# Altium footprint library flight_controller_footprint_lib.PcbLib: 48 footprints (part 2 of 3)
Each footprint in its own frame and in the unit in brackets; x right, y up, seen from the top. Pads: shape width x height; smd on the part's side, far side on the other; paste and mask are expansions set on the pad; w line width, h text height; cw(c..) or ccw(c..) is an arc to the next point about the centre after c.
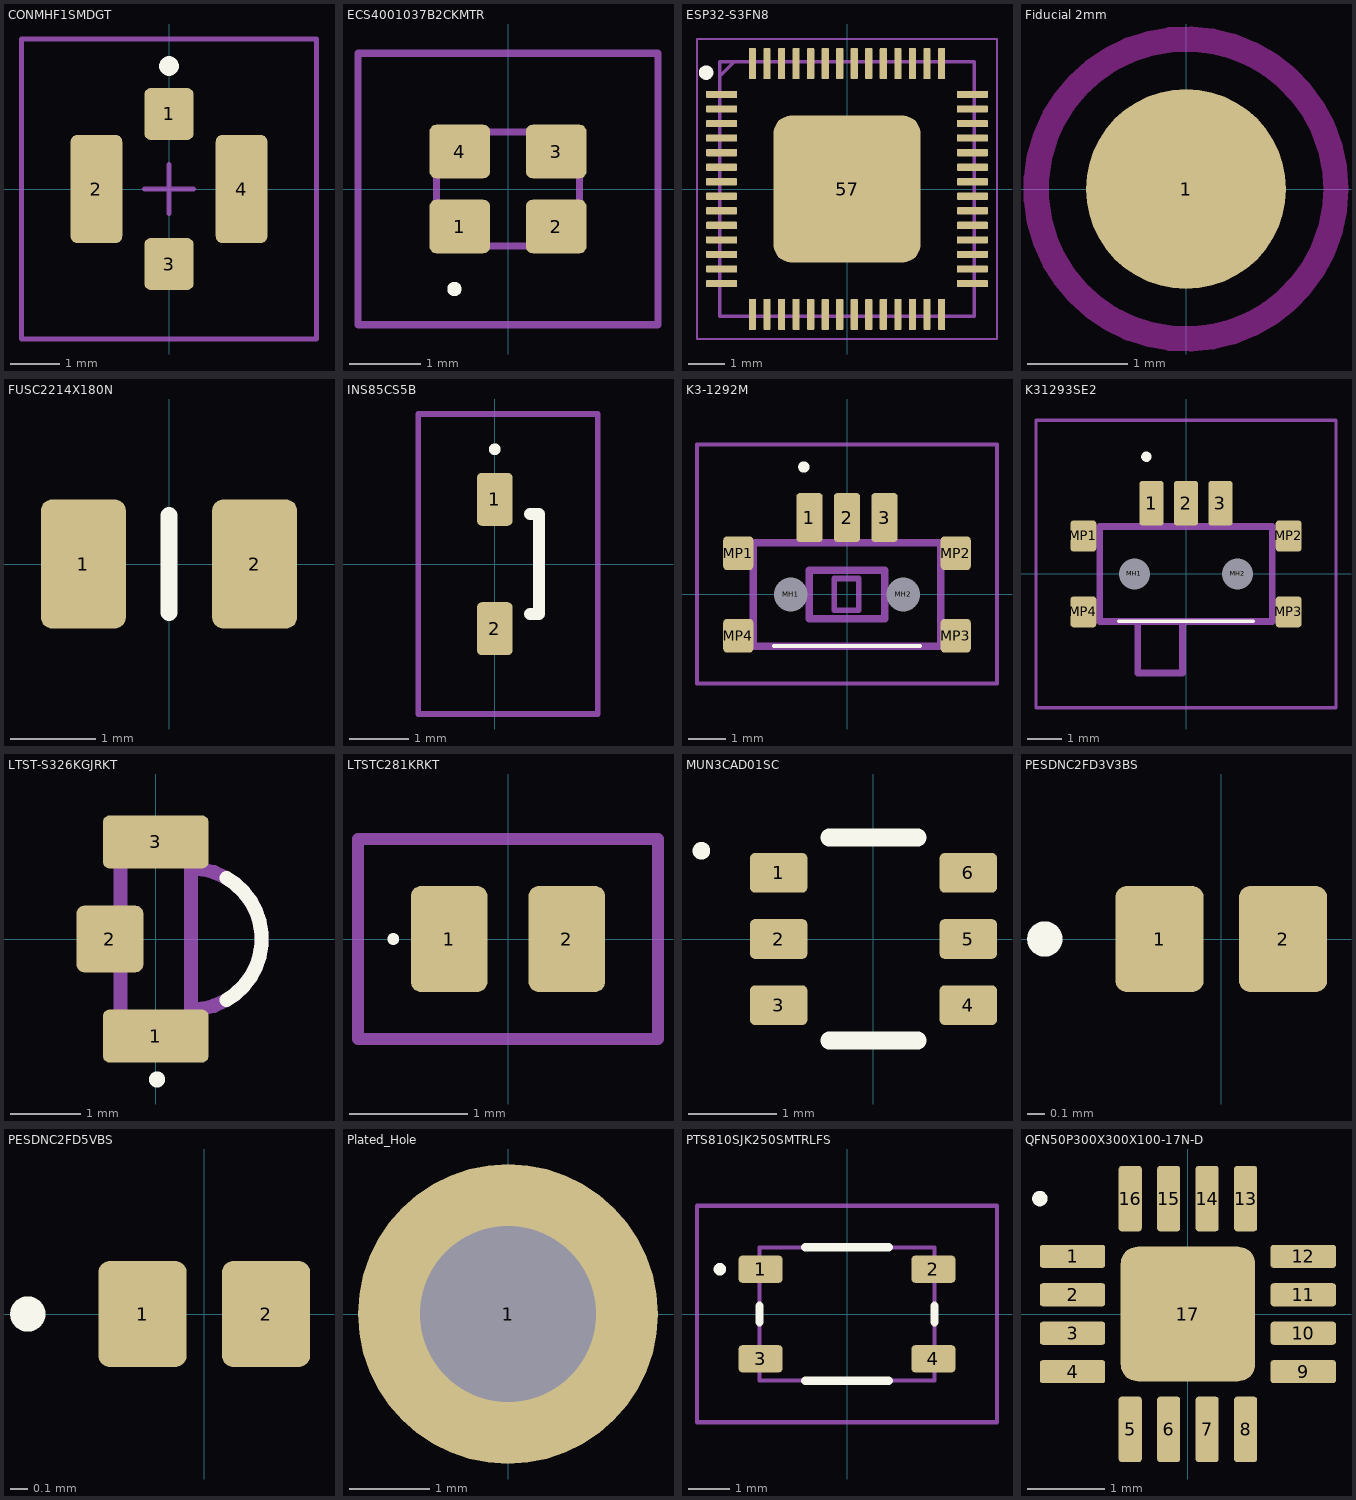
[diagram p1: the footprints below, top view; thin cyan lines are the x and y axes]

## CONMHF1SMDGT [mm]
pads (4):
  rrect25% 1x1.05 smd: 1(0,1.525) 3(0,-1.525)
  rrect25% 1.05x2.2 smd: 2(-1.475,0) 4(1.475,0)
Top Overlay:
  lines w0.2: -0.1,2.5 cw(c0,2.5) 0.1,2.5 cw(c0,2.5) -0.1,2.5
Top Assembly:
  lines w0.1: -0.5,0 0,0 ; 0,-0.5 0,0 ; 0,0.5 0,0 ; 0.5,0 0,0
Top Courtyard:
  lines w0.1: -3,-3.05 -3,3.05 3,3.05 3,-3.05 -3,-3.05
Top Designator:
  text ".Designator" at -3.749,-0.25 h0.75
3D body "CONMHF1-SMD-G-T.stp": height 1.31, standoff 0, extent -1.5,-1.55 1.5,1.55

## ECS4001037B2CKMTR [mm]
pads (4):
  rrect25% 0.85x0.75 smd: 1(-0.675,-0.525) 2(0.675,-0.525) 3(0.675,0.525) 4(-0.675,0.525)
Top Overlay:
  lines w0.1: -0.8,-1.4 cw(c-0.75,-1.4) -0.7,-1.4 cw(c-0.75,-1.4) -0.8,-1.4
Top Assembly:
  lines w0.1: -1,-0.8 -1,0.8 1,0.8 1,-0.8 -1,-0.8
Top Courtyard:
  lines w0.1: -2.1,-1.9 -2.1,1.9 2.1,1.9 2.1,-1.9 -2.1,-1.9
Top Designator:
  text ".Designator" at -3.749,-0.25 h0.75
3D body "ECS-400-10-37B2-CKM-TR.stp": height 0.5, standoff 0, extent -1,-0.8 1,0.8

## ESP32-S3FN8 [mm]
pads (57):
  rrect25% 0.85x0.2 smd: 1(-3.45,2.6) 2(-3.45,2.2) 3(-3.45,1.8) 4(-3.45,1.4) 5(-3.45,1) 6(-3.45,0.6) 7(-3.45,0.2) 8(-3.45,-0.2) 9(-3.45,-0.6) 10(-3.45,-1) 11(-3.45,-1.4) 12(-3.45,-1.8) 13(-3.45,-2.2) 14(-3.45,-2.6) 29(3.45,-2.6) 30(3.45,-2.2) 31(3.45,-1.8) 32(3.45,-1.4) 33(3.45,-1) 34(3.45,-0.6) 35(3.45,-0.2) 36(3.45,0.2) 37(3.45,0.6) 38(3.45,1) 39(3.45,1.4) 40(3.45,1.8) 41(3.45,2.2) 42(3.45,2.6)
  rrect25% 0.2x0.85 smd: 15(-2.6,-3.45) 16(-2.2,-3.45) 17(-1.8,-3.45) 18(-1.4,-3.45) 19(-1,-3.45) 20(-0.6,-3.45) 21(-0.2,-3.45) 22(0.2,-3.45) 23(0.6,-3.45) 24(1,-3.45) 25(1.4,-3.45) 26(1.8,-3.45) 27(2.2,-3.45) 28(2.6,-3.45) 43(2.6,3.45) 44(2.2,3.45) 45(1.8,3.45) 46(1.4,3.45) 47(1,3.45) 48(0.6,3.45) 49(0.2,3.45) 50(-0.2,3.45) 51(-0.6,3.45) 52(-1,3.45) 53(-1.4,3.45) 54(-1.8,3.45) 55(-2.2,3.45) 56(-2.6,3.45)
  rrect25% 4.05x4.05 smd: 57(0,0)
Top Overlay:
  circle w0.2: c-3.875,3.2 r0.1
Top Assembly:
  lines w0.1: -3.5,3.1 -3.1,3.5 ; -3.5,-3.5 3.5,-3.5 3.5,3.5 -3.5,3.5 -3.5,-3.5
Top Courtyard:
  lines w0.05: -4.125,-4.125 4.125,-4.125 4.125,4.125 -4.125,4.125 -4.125,-4.125
Top Designator:
  text ".Designator" at -3.749,-0.25 h0.75
  text ".Designator" at -3.749,-0.25 h0.75
3D body "ESP32-S3FN8.stp": height 0.9, standoff 0, extent -3.55,-3.55 3.55,3.55

## Fiducial 2mm [mm]
pads (1):
  round 2 smd: 1(0,0)
Top Layer keep-out:
  circle w0.254: c0,0 r1.5

## FUSC2214X180N [mm]
pads (2):
  rrect25% 1x1.52 smd: 1(-1.01,0) 2(1.01,0)
Top Overlay:
  lines w0.2: 0,-0.575 0,0.575
Top Designator:
  text ".Designator" at -3.749,-0.25 h0.75
3D body "0ZCK0100FF2E.stp": height 1.8, standoff 0, extent -1.075,-0.675 1.075,0.675

## INS85CS5B [mm]
pads (2):
  rrect25% 0.6x0.9 smd: 1(0,1.1) 2(0,-1.1)
Top Overlay:
  lines w0.1: 0,1.9 cw(c0,1.95) 0,2 cw(c0,1.95) 0,1.9
  lines w0.2: 0.6,-0.85 0.75,-0.85 0.75,0.85 0.6,0.85
Top Courtyard:
  lines w0.1: -1.3,-2.55 -1.3,2.55 1.75,2.55 1.75,-2.55 -1.3,-2.55
Top Designator:
  text ".Designator" at -3.524,-0.25 h0.75
3D body "IN-S85CS5B.stp": height 0.8, standoff 0, extent -0.25,-1.05 0.75,1.05

## K3-1292M [mm] "1P2T ultra-small (surface-mount) toggle switch"
pads (9):
  rrect25% 0.7x1.3 smd: 1(-1,2.05) 2(0,2.05) 3(1,2.05)
  round 0.45 hole 0.9 unplated: MH1(-1.5,0) MH2(1.5,0)
  rrect25% 0.8x0.9 smd: MP1(-2.9,1.1) MP2(2.9,1.1) MP3(2.9,-1.1) MP4(-2.9,-1.1)
Top Overlay:
  lines w0.1: -1.95,-1.375 1.95,-1.375 -1.95,-1.375
  lines w0.2: -1.2,3.4 ccw(c-1.15,3.4) -1.1,3.4 ; -1.2,3.4 cw(c-1.15,3.4) -1.1,3.4 ; -1.2,3.4 ccw(c-1.15,3.4) -1.1,3.4
Top Assembly:
  lines w0.15: -0.338,0.425 -0.338,-0.425 0.312,-0.425 0.312,0.425 -0.313,0.425
  lines w0.2: -1.4,-1.375 -0.1,-1.375 ; -2.5,-1.375 2.5,-1.375 2.5,1.375 -2.5,1.375 -2.5,-1.375 ; -1,-0.65 1,-0.65 1,0.65 -1,0.65 -1,-0.65
Top Courtyard:
  lines w0.1: -4,-2.375 -2.175,-2.375 2.175,-2.375 4,-2.375 4,4 -4,4 -4,-2.37
Top Designator:
  text ".Designator" at -3.749,0.038 h0.75
  text ".Designator" at -3.749,0.038 h0.75
3D body "HRO_K3-1293S - K3-1292M.step": height 2.2, standoff -0.5, extent -3,-1.375 3,2.375

## K31293SE2 [mm]
pads (9):
  rrect25% 0.7x1.3 smd: 1(-1,2.05) 2(0,2.05) 3(1,2.05)
  round 0.45 hole 0.9 unplated: MH1(-1.5,0) MH2(1.5,0)
  rrect25% 0.75x0.9 smd: MP1(-2.975,1.1) MP2(2.975,1.1) MP3(2.975,-1.1) MP4(-2.975,-1.1)
Top Overlay:
  lines w0.1: -1.95,-1.375 1.95,-1.375 -1.95,-1.375
  lines w0.2: -1.2,3.4 ccw(c-1.15,3.4) -1.1,3.4 ; -1.2,3.4 cw(c-1.15,3.4) -1.1,3.4 ; -1.2,3.4 ccw(c-1.15,3.4) -1.1,3.4
Top Assembly:
  lines w0.2: -2.5,-1.375 -2.5,1.375 2.5,1.375 2.5,-1.375 -2.5,-1.375 ; -1.4,-2.875 -1.4,-1.375 -0.1,-1.375 -0.1,-2.875 -1.4,-2.875
Top Courtyard:
  lines w0.1: -4.35,-3.875 -4.35,4.45 4.35,4.45 4.35,-3.875 -4.35,-3.875
Top Designator:
  text ".Designator" at -3.749,0.038 h0.75
  text ".Designator" at -3.749,0.038 h0.75
3D body "HRO_K3-1293S.step": height 1.4, standoff -0.5, extent -3,-2.875 3,2.375

## LTST-S326KGJRKT [mm]
pads (3):
  rrect25% 1.5x0.75 smd: 1(0,-1.375) 3(0,1.375)
  rrect25% 0.95x0.95 smd: 2(-0.65,0)
Top Overlay:
  circle w0.2: c0.018,-1.989 r0.014
  lines w0.2: 1,-0.866 ccw(c0.5,0) 1,0.866
Top Assembly:
  lines w0.2: 0.5,-1 ccw(c0.5,0) 0.5,1 ; -0.5,-1.5 0.5,-1.5 0.5,1.5 -0.5,1.5 -0.5,-1.5
Top Designator:
  text ".Designator" at -3.562,-0.376 h0.75
3D body "LTST-S326KGJRKT.stp": height 1, standoff 0, extent -0.5,-1.5 1.5,1.5

## LTSTC281KRKT [mm]
pads (2):
  rrect25% 0.65x0.9 smd: 1(-0.5,0) 2(0.5,0)
Top Overlay:
  lines w0.05: -1,0 ccw(c-0.975,0) -0.95,0 ccw(c-0.975,0) -1,0
Top Courtyard:
  lines w0.1: -1.275,-0.85 1.275,-0.85 1.275,0.85 -1.275,0.85 -1.275,-0.85
Top Designator:
  text ".Designator" at -3.749,-0.25 h0.75
3D body "LTST-C281KRKT.stp": height 0.35, standoff 0, extent -0.5,-0.25 0.5,0.25

## MUN3CAD01SC [mm]
pads (6):
  rrect25% 0.65x0.45 smd: 1(-1.075,0.75) 2(-1.075,0) 3(-1.075,-0.75) 4(1.075,-0.75) 5(1.075,0) 6(1.075,0.75)
Top Overlay:
  lines w0.1: -2,1 ccw(c-1.95,1) -1.9,1 ccw(c-1.95,1) -2,1
  lines w0.2: -0.5,-1.15 0.5,-1.15 ; -0.5,1.15 0.5,1.15
Top Designator:
  text ".Designator" at -4.023,-0.25 h0.75
3D body "MUN3CAD01-SC.stp": height 1.15, standoff 0, extent -1.45,-1.15 1.45,1.15

## PESDNC2FD3V3BS [mm]
pads (2):
  rrect25% 0.5x0.6 smd: 1(-0.35,0) 2(0.35,0)
Top Overlay:
  lines w0.1: -1.05,0 cw(c-1,0) -0.95,0 cw(c-1,0) -1.05,0
Top Designator:
  text ".Designator" at -3.948,-0.25 h0.75
3D body "PESDNC2FD3V3BS.stp": height 0.6, standoff 0, extent -0.55,-0.308 0.55,0.308

## PESDNC2FD5VBS [mm]
pads (2):
  rrect25% 0.5x0.6 smd: 1(-0.35,0) 2(0.35,0)
Top Overlay:
  lines w0.1: -1.05,0 cw(c-1,0) -0.95,0 cw(c-1,0) -1.05,0
Top Designator:
  text ".Designator" at -3.749,-0.25 h0.75
3D body "PESDNC2FD5VBS.stp": height 0.6, standoff 0, extent -0.55,-0.308 0.55,0.308

## Plated_Hole [mm] "2.2mm diameter"
pads (1):
  round 3.75 hole 2.2: 1(0,0)
Top Designator:
  text ".Designator" at -3.749,-0.25 h0.75

## PTS810SJK250SMTRLFS [mm]
pads (4):
  rrect25% 1.05x0.65 smd: 1(-2.075,1.075) 2(2.075,1.075) 3(-2.075,-1.075) 4(2.075,-1.075)
Top Overlay:
  lines w0.2: -2.1,-0.2 -2.1,0.2 ; -1,-1.6 1,-1.6 ; -1,1.6 1,1.6 ; 2.1,-0.2 2.1,0.2 ; -3.1,1.075 ccw(c-3.05,1.075) -3,1.075 ; -3.1,1.075 cw(c-3.05,1.075) -3,1.075 ; -3.1,1.075 ccw(c-3.05,1.075) -3,1.075
Top Assembly:
  lines w0.1: -2.1,-1.6 2.1,-1.6 2.1,1.6 -2.1,1.6 -2.1,-1.6
Top Courtyard:
  lines w0.1: -3.6,-2.6 3.6,-2.6 3.6,2.6 -3.6,2.6 -3.6,-2.6
Top Designator:
  text ".Designator" at -3.749,-0.25 h0.75
3D body "PTS810SJK250SMTR_LFS.stp": height 2.7, standoff 0, extent -2.3,-1.6 2.3,1.6

## QFN50P300X300X100-17N-D [mm]
pads (17):
  rrect25% 0.85x0.3 smd: 1(-1.5,0.75) 2(-1.5,0.25) 3(-1.5,-0.25) 4(-1.5,-0.75) 9(1.5,-0.75) 10(1.5,-0.25) 11(1.5,0.25) 12(1.5,0.75)
  rrect25% 0.3x0.85 smd: 5(-0.75,-1.5) 6(-0.25,-1.5) 7(0.25,-1.5) 8(0.75,-1.5) 13(0.75,1.5) 14(0.25,1.5) 15(-0.25,1.5) 16(-0.75,1.5)
  rrect25% 1.75x1.75 smd: 17(0,0)
Top Overlay:
  circle w0.1: c-1.925,1.5 r0.05
Top Designator:
  text ".Designator" at -3.749,-0.25 h0.75
3D body "BQ24075QRGTRQ1.stp": height 1, standoff 0, extent -1.5,-1.5 1.5,1.5